# Altium schematic symbol library MSAST21GBB5226MTNC12.SchLib: 1 symbol
Pins are listed as number, name and electrical type; pins without a type are passive.

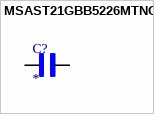
[diagram p0: symbol MSAST21GBB5226MTNC12]

## MSAST21GBB5226MTNC12
designator C?
MF: {'manufacturer': u'Taiyo Yuden'}; MP: MSAST21GBB5226MTNC12; Package: None; Price: None; Value: *; Availability: Unavailable
footprint CAPC2012X145N
pins: 1, 2